# Altium footprint library zulu_a7.PcbLib: 32 footprints (part 2 of 2)
Each footprint in its own frame and in the unit in brackets; x right, y up, seen from the top. Pads: shape width x height; smd on the part's side, far side on the other; paste and mask are expansions set on the pad; w line width, h text height; cw(c..) or ccw(c..) is an arc to the next point about the centre after c.
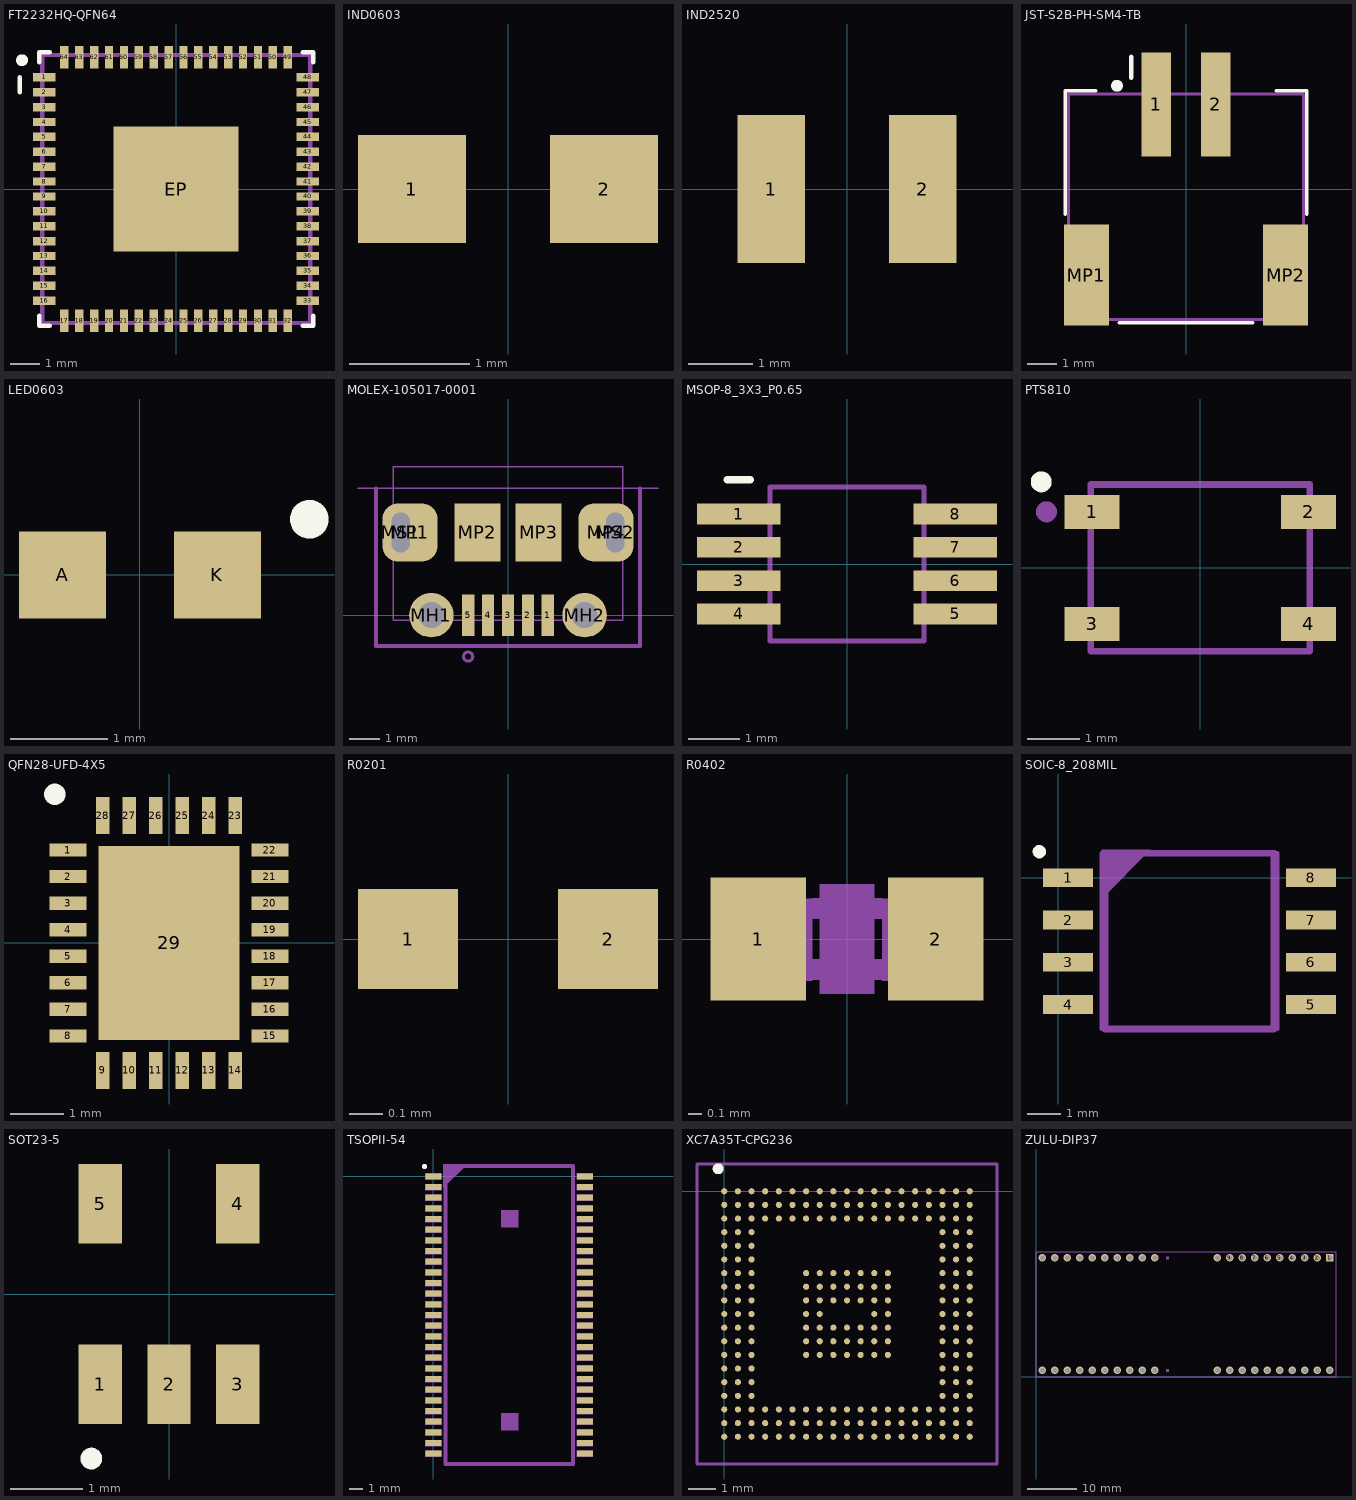
[diagram p1: the footprints below, top view; thin cyan lines are the x and y axes]

## FT2232HQ-QFN64 [mm] "FTDI FT2232HQ QFN-64 9x9 mm, 0.5 mm pitch, 4.20 mm exposed-pad land"
height 0.9
pads (65):
  rect 0.75x0.28 smd: 1(-4.425,3.75) 2(-4.425,3.25) 3(-4.425,2.75) 4(-4.425,2.25) 5(-4.425,1.75) 6(-4.425,1.25) 7(-4.425,0.75) 8(-4.425,0.25) 9(-4.425,-0.25) 10(-4.425,-0.75) 11(-4.425,-1.25) 12(-4.425,-1.75) 13(-4.425,-2.25) 14(-4.425,-2.75) 15(-4.425,-3.25) 16(-4.425,-3.75) 33(4.425,-3.75) 34(4.425,-3.25) 35(4.425,-2.75) 36(4.425,-2.25) 37(4.425,-1.75) 38(4.425,-1.25) 39(4.425,-0.75) 40(4.425,-0.25) 41(4.425,0.25) 42(4.425,0.75) 43(4.425,1.25) 44(4.425,1.75) 45(4.425,2.25) 46(4.425,2.75) 47(4.425,3.25) 48(4.425,3.75)
  rect 0.28x0.75 smd: 17(-3.75,-4.425) 18(-3.25,-4.425) 19(-2.75,-4.425) 20(-2.25,-4.425) 21(-1.75,-4.425) 22(-1.25,-4.425) 23(-0.75,-4.425) 24(-0.25,-4.425) 25(0.25,-4.425) 26(0.75,-4.425) 27(1.25,-4.425) 28(1.75,-4.425) 29(2.25,-4.425) 30(2.75,-4.425) 31(3.25,-4.425) 32(3.75,-4.425) 49(3.75,4.425) 50(3.25,4.425) 51(2.75,4.425) 52(2.25,4.425) 53(1.75,4.425) 54(1.25,4.425) 55(0.75,4.425) 56(0.25,4.425) 57(-0.25,4.425) 58(-0.75,4.425) 59(-1.25,4.425) 60(-1.75,4.425) 61(-2.25,4.425) 62(-2.75,4.425) 63(-3.25,4.425) 64(-3.75,4.425)
  rect 4.2x4.2 smd paste-4.2: EP(0,0)
Top Overlay:
  circle w0.2: c-5.175,4.325 r0.1
  lines w0.15: -5.25,3.25 -5.25,3.75 ; -4.6,-4.25 -4.6,-4.6 -4.25,-4.6 ; -4.6,4.25 -4.6,4.6 -4.25,4.6 ; 4.25,-4.6 4.6,-4.6 4.6,-4.25 ; 4.25,4.6 4.6,4.6 4.6,4.25
Top Paste:
  rectangle: 0.75,0.75 1.75,1.75
  rectangle: 0.75,-0.5 1.75,0.5
  rectangle: 0.75,-1.75 1.75,-0.75
  rectangle: -0.5,0.75 0.5,1.75
  rectangle: -0.5,-0.5 0.5,0.5
  rectangle: -0.5,-1.75 0.5,-0.75
  rectangle: -1.75,0.75 -0.75,1.75
  rectangle: -1.75,-0.5 -0.75,0.5
  rectangle: -1.75,-1.75 -0.75,-0.75
Mechanical 3:
  lines w0.15: -4.5,-4.5 -4.5,4.5 4.5,4.5 4.5,-4.5 -4.5,-4.5
3D body: height 0.9, standoff 0, extent -4.5,-4.5 4.5,4.5

## IND0603 [mil] "IND0603"
pads (2):
  rect 35.43x35.43 smd: 1(-31.5,0) 2(31.5,0)
3D body: height 37.4, standoff 0, extent -31.5,-15.75 31.5,15.75

## IND2520 [mm] "2520 inductor (Murata DFE2520), 1.05 x 2.30 pads on 2.35 pitch"
height 1.2
pads (2):
  rect 1.05x2.3 smd: 1(-1.175,0) 2(1.175,0)
3D body: height 1.2, standoff 0, extent -1.25,-1 1.25,1

## JST-S2B-PH-SM4-TB [mm] "JST PH 2.0 mm 2-pin side-entry SMT header S2B-PH-SM4-TB; validated stock land pattern"
height 4.5
pads (4):
  rect 1x3.5 smd: 1(-1,2.85) 2(1,2.85)
  rect 1.5x3.4 smd: MP1(-3.35,-2.9) MP2(3.35,-2.9)
Top Overlay:
  circle w0.2: c-2.325,3.475 r0.1
  lines w0.12: -4.06,-0.85 -4.06,3.31 -3.04,3.31 ; -2.25,-4.51 2.25,-4.51 ; 3.04,3.31 4.06,3.31 4.06,-0.85
  lines w0.15: -1.85,3.75 -1.85,4.45
Mechanical 3:
  lines w0.1: -3.95,-4.4 -3.95,3.2 3.95,3.2 3.95,-4.4 -3.95,-4.4
3D body: height 5.5, standoff 0, extent -3.95,-4.4 3.95,3.2

## LED0603 [mil] "LED0603"
pads (2):
  rect 35.43x35.43 smd: A(-31.5,0) K(31.5,0)
Top Overlay:
  circle w7.87: c68.9,22.64 r3.94
3D body: height 25.59, standoff 0, extent -31.5,-15.75 31.5,15.75

## MOLEX-105017-0001 [mm] "MOLEX-105017-0001"
pads (13):
  rect 0.4x1.35 smd: 1(1.3,0) 2(0.65,0) 3(0,0) 4(-0.65,0) 5(-1.3,0)
  round 1.45 hole 0.85: MH1(-2.5,0) MH2(2.5,0)
  rrect56% 1.8x1.9 smd: MP1(-3.2,2.7) MP4(3.2,2.7)
  rect 1.5x1.9 smd: MP2(-1,2.7) MP3(1,2.7)
  oval 1.11x1.81 / inner oval 0.9x1.6 / far side oval 1.11x1.81 hole 0.6 slot 1.3 at 90 deg: MS1(-3.5,2.7) MS2(3.5,2.7)
Mechanical 2:
  lines w0: -3.8,2.35 ccw(c-3.5,2.35) -3.2,2.35 -3.2,3.05 ccw(c-3.5,3.05) -3.8,3.05 -3.8,2.35 ; 3.2,2.35 ccw(c3.5,2.35) 3.8,2.35 3.8,3.05 ccw(c3.5,3.05) 3.2,3.05 3.2,2.35
Mechanical 3:
  lines w0.05: -3.75,-0.159 -3.75,4.841 3.75,4.841 3.75,-0.159 -3.75,-0.159
Mechanical 7:
  circle w0.1: c-1.3,-1.35 r0.15
  lines w0.127: -4.3,4.141 -4.3,-1 4.3,-1 4.3,4.141
Mechanical 19:
  lines w0.05: -4.893,4.141 4.893,4.141
3D body: height 2.85, standoff 0, extent -3.775,-0.184 3.775,4.866

## MSOP-8_3X3_P0.65 [mm] "MSOP-8 3 x 3 mm, 0.65 mm pitch (JEDEC MO-187 AA); pads 1.625 x 0.40 at +-2.1125; 93LC46BT-I/MS"
height 1.1
pads (8):
  rect 1.625x0.4 smd: 1(-2.113,0.975) 2(-2.113,0.325) 3(-2.113,-0.325) 4(-2.113,-0.975) 5(2.113,-0.975) 6(2.113,-0.325) 7(2.113,0.325) 8(2.113,0.975)
Top Overlay:
  lines w0.15: -2.335,1.645 -1.885,1.645
Mechanical 3:
  lines w0.1: -1.5,-1.5 1.5,-1.5 1.5,1.5 -1.5,1.5 -1.5,-1.5
3D body: height 1.1, standoff 0, extent -1.5,-1.5 1.5,1.5

## PTS810 [mm] "PTS810"
pads (4):
  rect 1.05x0.65 smd: 1(-2.075,1.075) 2(2.075,1.075) 3(-2.075,-1.075) 4(2.075,-1.075)
Top Overlay:
  circle w0.2: c-3.05,1.65 r0.1
Mechanical 3:
  lines w0.127: -2.1,-1.6 -2.1,1.6 2.1,1.6 2.1,-1.6 -2.1,-1.6
Mechanical 7:
  circle w0.2: c-2.95,1.075 r0.1
  lines w0.127: -2.1,-0.536 -2.1,0.536 ; -1.337,-1.6 1.337,-1.6 ; -1.337,1.6 1.337,1.6 ; 2.1,-0.536 2.1,0.536
3D body: height 2.7, standoff 0, extent -2.1,-1.6 2.1,1.6

## QFN28-UFD-4X5 [mm] "UFD 28-lead QFN 4 x 5 mm, 0.5 pitch, exposed pad 2.65 x 3.65 (pad 29 = GND); LTC DWG 05-08-1712 Rev B recommended pads"
height 0.75
pads (29):
  rect 0.7x0.25 smd: 1(-1.9,1.75) 2(-1.9,1.25) 3(-1.9,0.75) 4(-1.9,0.25) 5(-1.9,-0.25) 6(-1.9,-0.75) 7(-1.9,-1.25) 8(-1.9,-1.75) 15(1.9,-1.75) 16(1.9,-1.25) 17(1.9,-0.75) 18(1.9,-0.25) 19(1.9,0.25) 20(1.9,0.75) 21(1.9,1.25) 22(1.9,1.75)
  rect 0.25x0.7 smd: 9(-1.25,-2.4) 10(-0.75,-2.4) 11(-0.25,-2.4) 12(0.25,-2.4) 13(0.75,-2.4) 14(1.25,-2.4) 23(1.25,2.4) 24(0.75,2.4) 25(0.25,2.4) 26(-0.25,2.4) 27(-0.75,2.4) 28(-1.25,2.4)
  rect 2.65x3.65 smd: 29(0,0)
Top Overlay:
  circle w0.2: c-2.15,2.8 r0.1
3D body: height 0.8, standoff 0, extent -2,-2.5 2,2.5

## R0201 [mm] "0201 resistor, 0.30 x 0.30 pads on 0.60 pitch"
height 0.26
pads (2):
  rect 0.3x0.3 smd: 1(-0.3,0) 2(0.3,0)
3D body: height 0.26, standoff 0, extent -0.3,-0.15 0.3,0.15

## R0402 [mm] "R0402"
pads (2):
  rect 0.7x0.9 smd: 1(-0.65,0) 2(0.65,0)
Mechanical 4:
  region: -0.554,-0.305 -0.554,0.295 -0.254,0.295 -0.254,-0.305
  region: 0.259,-0.305 0.259,0.295 0.559,0.295 0.559,-0.305
  lines w0.152: -0.245,-0.224 0.245,-0.224 ; -0.245,0.224 0.245,0.224
Bottom Glue Points:
  region: -0.2,-0.4 -0.2,0.4 0.2,0.4 0.2,-0.4
3D body: height 0.4, standoff 0, extent -0.5,-0.25 0.5,0.25

## SOIC-8_208MIL [mm] "SOIC-8_208MIL"
pads (8):
  rect 1.51x0.56 smd: 1(0.299,0) 2(0.299,-1.27) 3(0.299,-2.54) 4(0.299,-3.81) 5(7.599,-3.81) 6(7.599,-2.54) 7(7.599,-1.27) 8(7.599,0)
Top Overlay:
  circle w0.2: c-0.566,0.785 r0.1
Mechanical 4:
  region: 7.249,-0.21 7.249,0.21 7.899,0.21 7.899,-0.21
  region: 7.249,-1.48 7.249,-1.06 7.899,-1.06 7.899,-1.48
  region: 7.249,-2.75 7.249,-2.33 7.899,-2.33 7.899,-2.75
  region: 7.249,-4.02 7.249,-3.6 7.899,-3.6 7.899,-4.02
  region: -0.001,-4.02 -0.001,-3.6 0.649,-3.6 0.649,-4.02
  region: -0.001,-2.75 -0.001,-2.33 0.649,-2.33 0.649,-2.75
  region: -0.001,-1.48 -0.001,-1.06 0.649,-1.06 0.649,-1.48
  region: -0.001,-0.21 -0.001,0.21 0.649,0.21 0.649,-0.21
  lines w0.127: 1.31,-4.545 6.59,-4.545 6.59,0.735 1.31,0.735 1.31,-4.545
Mechanical 8:
  region: 1.305,0.837 1.305,-0.634 2.776,0.837
  lines w0.203: 1.406,-4.545 6.493,-4.545 6.493,0.735 1.406,0.735 1.406,-4.545
3D body: height 2.16, standoff 0, extent 1.309,-4.545 6.589,0.735

## SOT23-5 [mm] "SOT23-5 (Semtech SC189xSKTRT land, datasheet p.23): 0.95 pitch, pads 0.60 x 1.10, rows 2.50 apart; pins 1-3 one side, 4 opposite 3, 5 opposite 1 (as asar_feather.PcbLib)"
height 1.45
pads (5):
  rect 0.6x1.1 smd: 1(-0.95,-1.25) 2(0,-1.25) 3(0.95,-1.25) 4(0.95,1.25) 5(-0.95,1.25)
Top Overlay:
  circle w0.15: c-1.075,-2.275 r0.075
3D body: height 1.45, standoff 0, extent -1.45,-0.8 1.45,0.8

## TSOPII-54 [mm] "TSOPII-54"
pads (54):
  rect 1.2x0.45 smd: 1(0,0) 2(0,-0.8) 3(0,-1.6) 4(0,-2.4) 5(0,-3.2) 6(0,-4) 7(0,-4.8) 8(0,-5.6) 9(0,-6.4) 10(0,-7.2) 11(0,-8) 12(0,-8.8) 13(0,-9.6) 14(0,-10.4) 15(0,-11.2) 16(0,-12) 17(0,-12.8) 18(0,-13.6) 19(0,-14.4) 20(0,-15.2) 21(0,-16) 22(0,-16.8) 23(0,-17.6) 24(0,-18.4) 25(0,-19.2) 26(0,-20) 27(0,-20.8) 28(11.36,-20.8) 29(11.36,-20) 30(11.36,-19.2) 31(11.36,-18.4) 32(11.36,-17.6) 33(11.36,-16.8) 34(11.36,-16) 35(11.36,-15.2) 36(11.36,-14.4) 37(11.36,-13.6) 38(11.36,-12.8) 39(11.36,-12) 40(11.36,-11.2) 41(11.36,-10.4) 42(11.36,-9.6) 43(11.36,-8.8) 44(11.36,-8) 45(11.36,-7.2) 46(11.36,-6.4) 47(11.36,-5.6) 48(11.36,-4.8) 49(11.36,-4) 50(11.36,-3.2) 51(11.36,-2.4) 52(11.36,-1.6) 53(11.36,-0.8) 54(11.36,0)
Top Overlay:
  circle w0.2: c-0.675,0.735 r0.1
Mechanical 4:
  drawing of 108 lines, arcs and shapes, not listed
Mechanical 8:
  region: 0.752,0.927 0.752,-0.863 2.543,0.927
  region: 0.752,0.927 0.752,-0.863 2.543,0.927
  lines w0.305: 0.905,-21.575 10.455,-21.575 10.455,0.775 0.905,0.775 0.905,-21.575
Bottom Glue Points:
  region: 5.08,-19.05 5.08,-17.78 6.35,-17.78 6.35,-19.05
  region: 5.08,-3.81 5.08,-2.54 6.35,-2.54 6.35,-3.81
3D body: height 1.2, standoff 0, extent 0.6,-21.51 10.76,0.71

## XC7A35T-CPG236 [mm] "XC7A35T-CPG236"
pads (238):
  rrect100% 0.225x0.225 smd: A1(0,0) A2(0.5,0) A3(1,0) A4(1.5,0) A5(2,0) A6(2.5,0) A7(3,0) A8(3.5,0) A9(4,0) A10(4.5,0) A11(5,0) A12(5.5,0) A13(6,0) A14(6.5,0) A15(7,0) A16(7.5,0) A17(8,0) A18(8.5,0) A19(9,0) B1(0,-0.5) B2(0.5,-0.5) B3(1,-0.5) B4(1.5,-0.5) B5(2,-0.5) B6(2.5,-0.5) B7(3,-0.5) B8(3.5,-0.5) B9(4,-0.5) B10(4.5,-0.5) B11(5,-0.5) B12(5.5,-0.5) B13(6,-0.5) B14(6.5,-0.5) B15(7,-0.5) B16(7.5,-0.5) B17(8,-0.5) B18(8.5,-0.5) B19(9,-0.5) C1(0,-1) C2(0.5,-1) C3(1,-1) C4(1.5,-1) C5(2,-1) C6(2.5,-1) C7(3,-1) C8(3.5,-1) C9(4,-1) C10(4.5,-1) C11(5,-1) C12(5.5,-1) C13(6,-1) C14(6.5,-1) C15(7,-1) C16(7.5,-1) C17(8,-1) C18(8.5,-1) C19(9,-1) D1(0,-1.5) D2(0.5,-1.5) D3(1,-1.5) D17(8,-1.5) D18(8.5,-1.5) D19(9,-1.5) E1(0,-2) E2(0.5,-2) E3(1,-2) E17(8,-2) E18(8.5,-2) E19(9,-2) F1(0,-2.5) F2(0.5,-2.5) F3(1,-2.5) F17(8,-2.5) F18(8.5,-2.5) F19(9,-2.5) G1(0,-3) G2(0.5,-3) G3(1,-3) G7(3,-3) G8(3.5,-3) G9(4,-3) G10(4.5,-3) G11(5,-3) G12(5.5,-3) G13(6,-3) G17(8,-3) G18(8.5,-3) G19(9,-3) H1(0,-3.5) H2(0.5,-3.5) H3(1,-3.5) H7(3,-3.5) H8(3.5,-3.5) H9(4,-3.5) H10(4.5,-3.5) H11(5,-3.5) H12(5.5,-3.5) H13(6,-3.5) H17(8,-3.5) H18(8.5,-3.5) H19(9,-3.5) J1(0,-4) J2(0.5,-4) J3(1,-4) J7(3,-4) J8(3.5,-4) J9(4,-4) J10(4.5,-4) J11(5,-4) J12(5.5,-4) J13(6,-4) J17(8,-4) J18(8.5,-4) J19(9,-4) K1(0,-4.5) K2(0.5,-4.5) K3(1,-4.5) K7(3,-4.5) K8(3.5,-4.5) K12(5.5,-4.5) K13(6,-4.5) K17(8,-4.5) K18(8.5,-4.5) K19(9,-4.5) L1(0,-5) L2(0.5,-5) L3(1,-5) L7(3,-5) L8(3.5,-5) L9(4,-5) L10(4.5,-5) L11(5,-5) L12(5.5,-5) L13(6,-5) L17(8,-5) L18(8.5,-5) L19(9,-5) M1(0,-5.5) M2(0.5,-5.5) M3(1,-5.5) M7(3,-5.5) M8(3.5,-5.5) M9(4,-5.5) M10(4.5,-5.5) M11(5,-5.5) M12(5.5,-5.5) M13(6,-5.5) M17(8,-5.5) M18(8.5,-5.5) M19(9,-5.5) N1(0,-6) N2(0.5,-6) N3(1,-6) N7(3,-6) N8(3.5,-6) N9(4,-6) N10(4.5,-6) N11(5,-6) N12(5.5,-6) N13(6,-6) N17(8,-6) N18(8.5,-6) N19(9,-6) P1(0,-6.5) P2(0.5,-6.5) P3(1,-6.5) P17(8,-6.5) P18(8.5,-6.5) P19(9,-6.5) R1(0,-7) R2(0.5,-7) R3(1,-7) R17(8,-7) R18(8.5,-7) R19(9,-7) T1(0,-7.5) T2(0.5,-7.5) T3(1,-7.5) T17(8,-7.5) T18(8.5,-7.5) T19(9,-7.5) U1(0,-8) U2(0.5,-8) U3(1,-8) U4(1.5,-8) U5(2,-8) U6(2.5,-8) U7(3,-8) U8(3.5,-8) U9(4,-8) U10(4.5,-8) U11(5,-8) U12(5.5,-8) U13(6,-8) U14(6.5,-8) U15(7,-8) U16(7.5,-8) U17(8,-8) U18(8.5,-8) U19(9,-8) V1(0,-8.5) V2(0.5,-8.5) V3(1,-8.5) V4(1.5,-8.5) V5(2,-8.5) V6(2.5,-8.5) V7(3,-8.5) V8(3.5,-8.5) V9(4,-8.5) V10(4.5,-8.5) V11(5,-8.5) V12(5.5,-8.5) V13(6,-8.5) V14(6.5,-8.5) V15(7,-8.5) V16(7.5,-8.5) V17(8,-8.5) V18(8.5,-8.5) V19(9,-8.5) W1(0,-9) W2(0.5,-9) W3(1,-9) W4(1.5,-9) W5(2,-9) W6(2.5,-9) W7(3,-9) W8(3.5,-9) W9(4,-9) W10(4.5,-9) W11(5,-9) W12(5.5,-9) W13(6,-9) W14(6.5,-9) W15(7,-9) W16(7.5,-9) W17(8,-9) W18(8.5,-9) W19(9,-9)
Top Overlay:
  circle w0.2: c-0.225,0.825 r0.1
Mechanical 7:
  lines w0.1: -1,-10 10,-10 10,1 -1,1 -1,-10
3D body: height 1.38, standoff 0, extent -0.5,-9.5 9.5,0.5

## ZULU-DIP37 [mil] "ZULU-DIP37"
pads (40):
  rect 60x60 / inner round 55.43 / far side rect 60x60 hole 40: 1(2350,950)
  round 60 hole 40: 2(2250,950) 3(2150,950) 4(2050,950) 5(1950,950) 6(1850,950) 7(1750,950) 8(1650,950) 9(1550,950) 10(1450,950) 11(950,950) 12(850,950) 13(750,950) 14(650,950) 15(550,950) 16(450,950) 17(350,950) 18(250,950) 19(150,950) 20(50,950) 21(2350,50) 22(2250,50) 23(2150,50) 24(2050,50) 25(1950,50) 26(1850,50) 27(1750,50) 28(1650,50) 29(1550,50) 30(1450,50) 31(950,50) 32(850,50) 33(750,50) 34(650,50) 35(550,50) 36(450,50) 37(350,50) 38(250,50) 39(150,50) 40(50,50)
Mechanical 3:
  drawing of 40 lines, arcs and shapes, not listed
Mechanical 7:
  lines w6: 0,0 2400,0 2400,1000 0,1000 0,0
3D body: height 106.3, standoff 0, extent 1400,900 2400,1000
3D body: height 106.3, standoff 0, extent 0,900 1000,1000
3D body: height 106.3, standoff 0, extent 1400,0 2400,100
3D body: height 106.3, standoff 0, extent 0,0 1000,100